# Altium schematic symbol library Inductor.SchLib: 57 symbols
Pins are listed as number, name and electrical type; pins without a type are passive.

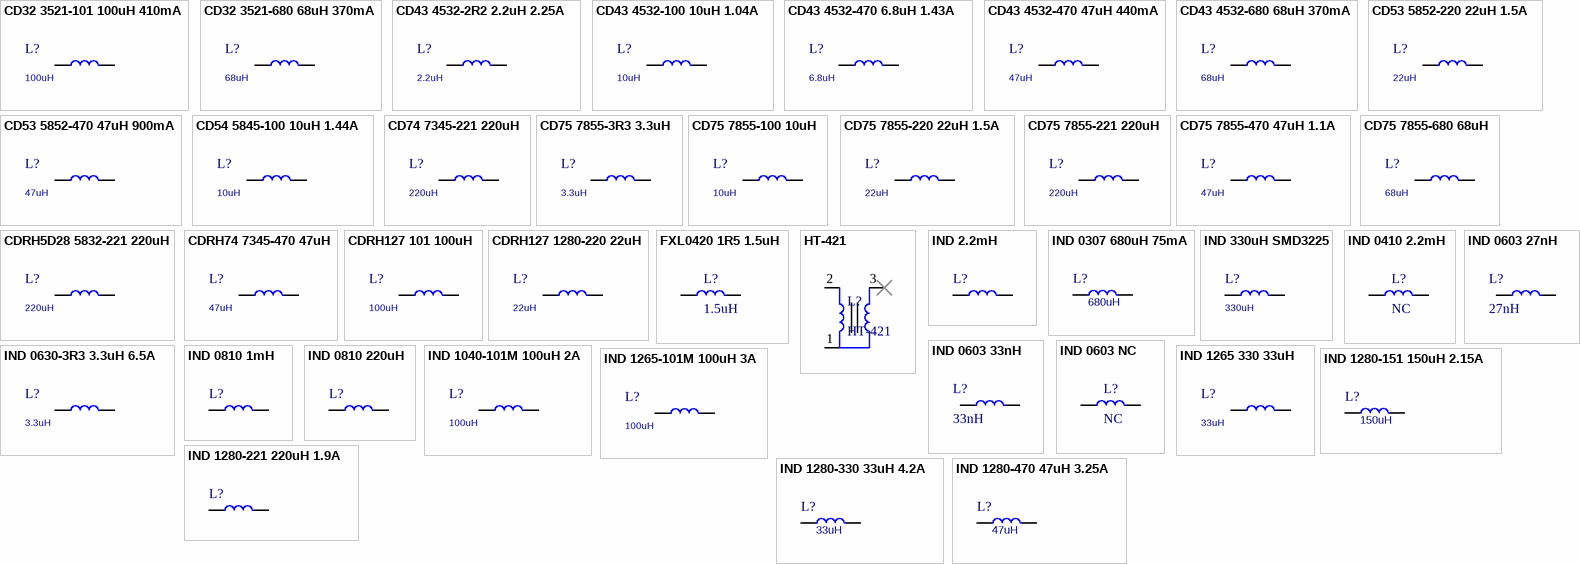
[diagram p0: symbols CD32 3521-101 100uH 410mA to IND 1280-470 47uH 3.25A]

## CD32 3521-101 100uH 410mA
designator L?, comment 100uH
INDUCTOR, POWER, SMD; Code: 1513-001
footprint CD32 (3.5*3*2mm£¨³¤¿í¸ß£©)
pins: 1, 2

## CD32 3521-680 68uH 370mA
designator L?, comment 68uH
INDUCTOR, POWER, SMD; Designed by: Nhox; Code: N/A
footprint CD32 (3.5*3*2mm£¨³¤¿í¸ß£©)
pins: 1, 2

## CD43 4532-2R2 2.2uH 2.25A
designator L?, comment 2.2uH
INDUCTOR, POWER, SMD; Code: N/A
footprint CD43 (4.5*4*3.2mm£¨³¤¿í¸ß£©)
pins: 1, 2

## CD43 4532-100 10uH 1.04A
designator L?, comment 10uH
INDUCTOR, POWER, SMD; Code: 1529-001
footprint CD43 (4.5*4*3.2mm£¨³¤¿í¸ß£©)
pins: 1, 2

## CD43 4532-470 6.8uH 1.43A
designator L?, comment 6.8uH
INDUCTOR, POWER, SMD; Code: 1523-024
footprint CD43 (4.5*4*3.2mm£¨³¤¿í¸ß£©)
pins: 1, 2

## CD43 4532-470 47uH 440mA
designator L?, comment 47uH
INDUCTOR, POWER, SMD; Code: 1523-024
footprint CD43 (4.5*4*3.2mm£¨³¤¿í¸ß£©)
pins: 1, 2

## CD43 4532-680 68uH 370mA
designator L?, comment 68uH
INDUCTOR, POWER, SMD; Code: 1523-014
footprint CD43 (4.5*4*3.2mm£¨³¤¿í¸ß£©)
pins: 1, 2

## CD53 5852-220 22uH 1.5A
designator L?, comment 22uH
INDUCTOR, POWER, SMD; Code: 1514-037
footprint CD53 (5.8*5.2*3.5mm£¨³¤¿í¸ß£©)
pins: 1, 2

## CD53 5852-470 47uH 900mA
designator L?, comment 47uH
INDUCTOR, POWER, SMD; Code: 1514-037
footprint CD53 (5.8*5.2*3.5mm£¨³¤¿í¸ß£©)
pins: 1, 2

## CD54 5845-100 10uH 1.44A
designator L?, comment 10uH
INDUCTOR, POWER, SMD; Code: 1515-005
footprint CD54 (5.8*5.2*4.5mm£¨³¤¿í¸ß£©)
pins: 1, 2

## CD74 7345-221 220uH
designator L?, comment 220uH
INDUCTOR SMD; Code: 1526-001
footprint CDRH74 (7.3*7.3*4.5mm)
pins: 1, 2

## CD75 7855-3R3 3.3uH
designator L?, comment 3.3uH
INDUCTOR SMD; Code: 1516-003
footprint CD75 (7.8*7*5mm£¨³¤¿í¸ß£©)
pins: 1, 2

## CD75 7855-100 10uH
designator L?, comment 10uH
INDUCTOR SMD; Code: 1516-006
footprint CD75 (7.8*7*5mm£¨³¤¿í¸ß£©)
pins: 1, 2

## CD75 7855-220 22uH 1.5A
designator L?, comment 22uH
INDUCTOR, POWER, SMD; Code: 1516-010
footprint CD75 (7.8*7*5mm£¨³¤¿í¸ß£©)
pins: 1, 2

## CD75 7855-221 220uH
designator L?, comment 220uH
INDUCTOR SMD; Code: N/A
footprint CD75 (7.8*7*5mm£¨³¤¿í¸ß£©)
pins: 1, 2

## CD75 7855-470 47uH 1.1A
designator L?, comment 47uH
INDUCTOR, POWER, SMD; Code: 1516-028
footprint CD75 (7.8*7*5mm£¨³¤¿í¸ß£©)
pins: 1, 2

## CD75 7855-680 68uH
designator L?, comment 68uH
INDUCTOR SMD; Code: 1516-028; Designed by: Nhox
footprint CD75 (7.8*7*5mm£¨³¤¿í¸ß£©)
pins: 1, 2

## CDRH5D28 5832-221 220uH
designator L?, comment 220uH
INDUCTOR SMD; Designed by: TranLuyen; Code: N/A
footprint CDRH5D28 5832 (5.7*5.7*3.2mm)
pins: 1, 2

## CDRH74 7345-470 47uH
designator L?, comment 47uH
INDUCTOR SMD CDRH74 7345-470 47uH 1.03A; Code: N/A
footprint CDRH127 (12*12*8mm)
footprint CDRH74 (7.3*7.3*4.5mm)
pins: 1, 2

## CDRH127 101 100uH
designator L?, comment 100uH
INDUCTOR SMD; Code: 1522-002
footprint CDRH127 (12*12*8mm)
pins: 1, 2

## CDRH127 1280-220 22uH
designator L?, comment 22uH
INDUCTOR SMD CDRH127 1280-220 22uH 6.3A; Designed by: TranLuyen; Code: N/A
footprint CDRH127 (12*12*8mm)
pins: 1, 2

## FXL0420 1R5 1.5uH
designator L?, comment 1.5uH
FXL0420 1R5 1.5uH +=20%, 5A, Isat 6A, DCR=38mOhm; Code: 1523-019
footprint FXL0420 (42x44x18mm)
pins: 1, 2

## HT-421
designator L?
1:150-20*18*18mm; Code: 1523-020
footprint HT-421 (20*18*18mm)
pins: 1, 2
text: 3

## IND 2.2mH
designator L?
10%, Size 3.0x7.0mm, 680uH, 1/4W; Code: 1502-041
footprint AL0307 (11*3*7mm£¨½Å¾à£¬Ö±¾¶£¬³¤¶È£©)
pins: 1, 2

## IND 0307 680uH 75mA
designator L?, comment 680uH
10%, Size 3.0x7.0mm, 680uH, 1/4W; Code: N/A; VALUE: 680uH
footprint AL0307 (11*3*7mm£¨½Å¾à£¬Ö±¾¶£¬³¤¶È£©)
pins: 1, 2

## IND 330uH SMD3225
designator L?, comment 330uH
330uH SMD3225 NLV32T-331J-PF; Code: 1523-022
footprint L 1210 (Ð¡¹¦ÂÊÌùÆ¬µç¸Ð)
pins: 1, 2

## IND 0410 2.2mH
designator L?, comment NC
Code: N/A
footprint AL0410_V (5*4*10.5mm£¨½Å¾à£¬Ö±¾¶£¬³¤¶È£©)
pins: 1, 2

## IND 0603 27nH
designator L?, comment 27nH
IND 0603 27nH; Designed by: Nhox; Code: N/A
footprint C_0603_SMD
pins: 1, 2

## IND 0603 33nH
designator L?, comment 33nH
IND 0603 33nH; Designed by: Nhox; Code: N/A
footprint C_0603_SMD
pins: 1, 2

## IND 0603 NC
designator L?, comment NC  (no BOM)
Code: N/A
footprint C_0603_SMD
pins: 1, 2

## IND 0630-3R3 3.3uH 6.5A
designator L?, comment 3.3uH
INDUCTOR, POWER, SMD; Code: N/A
footprint WHC0630 (6.6*6.6*3.4mm£¨³¤¿í¸ß£©)
pins: 1, 2

## IND 0810 1mH
designator L?, comment 1mH  (value not drawn)
INDUCTOR, POWER; Code: 1523-017
footprint PK0810 (5*9*12mm(½Å¾à£¬Ö±¾¶£¬¸ß£©)
pins: 1, 2

## IND 0810 220uH
designator L?, comment 220uH  (value not drawn)
INDUCTOR, POWER; Code: 1504-029
footprint PK0810 (5*9*12mm(½Å¾à£¬Ö±¾¶£¬¸ß£©)
pins: 1, 2

## IND 1040-101M 100uH 2A
designator L?, comment 100uH
INDUCTOR SMD; Designed by: TranLuyen; Code: N/A; LCSC Part: C5127567
footprint WHC1040 (10*10*4mm)
footprint WHC1040 - Mix DIP 11x21x22 (10*10*4mm)
pins: 1, 2

## IND 1265 330 33uH
designator L?, comment 33uH
INDUCTOR SMD; Code: N/A
footprint WHC1265 (WHC1265(12*6.5))
pins: 1, 2

## IND 1265-101M 100uH 3A
designator L?, comment 100uH
INDUCTOR SMD; Designed by: TranLuyen; Code: N/A
footprint WHC1265 (WHC1265(12*6.5))
footprint WHC1265 - Mix DIP 11x21x22 (WHC1265(12*6.5))
pins: 1, 2

## IND 1280-151 150uH 2.15A
designator L?, comment 150uH
20%, size 12 x 12 x 8mm, 2.15A, 150 uH; Code: 1522-001; VALUE: 150uH
footprint CDRH127 (12*12*8mm)
pins: 1, 2

## IND 1280-221 220uH 1.9A
designator L?, comment 220uH  (value not drawn)
CDRH127 size 12 x 12 x 8mm; Code: 1523-011; Designed by: TranLuyen
footprint CDRH127 (12*12*8mm)
pins: 1, 2

## IND 1280-330 33uH 4.2A
designator L?, comment 33uH
20%, size 12 x 12 x 8mm, 4.2A, 33uH; Code: 1523-013; VALUE: 33uH
footprint CDRH127 (12*12*8mm)
pins: 1, 2

## IND 1280-470 47uH 3.25A
designator L?, comment 47uH
20%, size 12 x 12 x 8mm, 3.25A, 47uH; Code: 1523-023; VALUE: 47uH
footprint CDRH127 (12*12*8mm)
pins: 1, 2

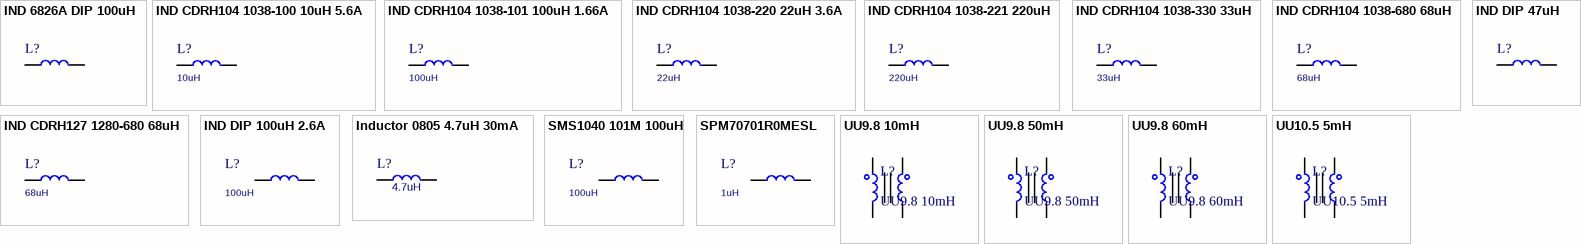
[diagram p1: symbols IND 6826A DIP 100uH to UU10.5 5mH]

## IND 6826A DIP 100uH
designator L?, comment 100uH  (value not drawn)
INDUCTOR DIP; Code: 1532-001
footprint 6826A
pins: 1, 2

## IND CDRH104 1038-100 10uH 5.6A
designator L?, comment 10uH
Inductor CDRH104 SMD 10x10x3.8mm; Designed by: TranLuyen; Code: N/A
footprint CDRH104 (10*10*3.8mm)
pins: 1, 2

## IND CDRH104 1038-101 100uH 1.66A
designator L?, comment 100uH
CDRH104 SMD 1038-101 100uH Max: 1.66A, 10x10x3.8mm; Code: 1527-001
footprint CDRH104 (10*10*3.8mm)
pins: 1, 2

## IND CDRH104 1038-220 22uH 3.6A
designator L?, comment 22uH
Inductor CDRH104 SMD 10x10x3.8mm; Designed by: TranLuyen; Code: N/A
footprint CDRH104 (10*10*3.8mm)
pins: 1, 2

## IND CDRH104 1038-221 220uH
designator L?, comment 220uH
CDRH104 SMD 1038-221 220uH Max: 1.19A, 10x10x3.8mm; Designed by: Nhox; Code: N/A
footprint CDRH104 (10*10*3.8mm)
pins: 1, 2

## IND CDRH104 1038-330 33uH
designator L?, comment 33uH
Inductor CDRH104 SMD 10x10x3.8mm 1038-330 33uH 2.9A; Designed by: Nhox; Code: N/A
footprint CDRH104 (10*10*3.8mm)
pins: 1, 2

## IND CDRH104 1038-680 68uH
designator L?, comment 68uH
CDRH104 SMD 1038-680 68uH Max: 2.08A, 10x10x3.8mm; Designed by: Nhox; Code: N/A
footprint CDRH104 (10*10*3.8mm)
pins: 1, 2

## IND CDRH127 1280-680 68uH
designator L?, comment 68uH
CDRH127 Cuộn Cảm Dán SMD 1280-680 68uH 3.2A; Code: N/A
footprint CDRH127 (12*12*8mm)
pins: 1, 2

## IND DIP 47uH
designator L?, comment 47uH  (value not drawn)
INDUCTOR DIP
footprint INDUCTOR_DIP
pins: 1, 2

## IND DIP 100uH 2.6A
designator L?, comment 100uH
INDUCTOR DIP; Designed by: TranLuyen; Code: N/A
footprint IND 11x21x22
pins: 1, 2

## Inductor 0805 4.7uH 30mA
designator L?, comment 4.7uH
4.7uH 0805 30mA; Code: 1511-036; VALUE: 4.7uH
footprint L 0805 (Ð¡¹¦ÂÊÌùÆ¬µç¸Ð)
pins: 1, 2

## SMS1040 101M 100uH
designator L?, comment 100uH
INDUCTOR SMD; Designed by: TranLuyen; Code: N/A; ComponentLink1Description: Datasheet; ComponentLink1URL: https://www.lcsc.com/datasheet/lcsc_datasheet_2208240930_LanTu-Micro-SMS1040-101MT_C5127567.pdf
footprint WHC1040 (10*10*4mm£¨³¤¿í¸ß£©)
pins: 1, 2

## SPM70701R0MESL
designator L?, comment 1uH
INDUCTOR, POWER, SMD; Designed by: TranLuyen; Code: N/A
footprint SPM70701R0MESL (7.2*6.6*3 mm)
pins: 1, 2

## UU9.8 10mH
designator L?
0.5A 10mH UU9.8; Code: 1505-002
footprint UU9.8
pins: 1, 2, 3, 4

## UU9.8 50mH
designator L?
Code: 1505-008
footprint UU9.8
pins: 1, 2, 3, 4

## UU9.8 60mH
designator L?
Code: 1505-009
footprint UU9.8
pins: 1, 2, 3, 4

## UU10.5 5mH
designator L?
5mH UU10.5; Code: 1505-010
footprint UU10.5 (18*16*20mm(³¤¿í¸ß£©)
pins: 1, 2, 3, 4